# Altium footprint library Connector.PcbLib: 272 footprints (part 3 of 17)
Each footprint in its own frame and in the unit in brackets; x right, y up, seen from the top. Pads: shape width x height; smd on the part's side, far side on the other; paste and mask are expansions set on the pad; w line width, h text height; cw(c..) or ccw(c..) is an arc to the next point about the centre after c.
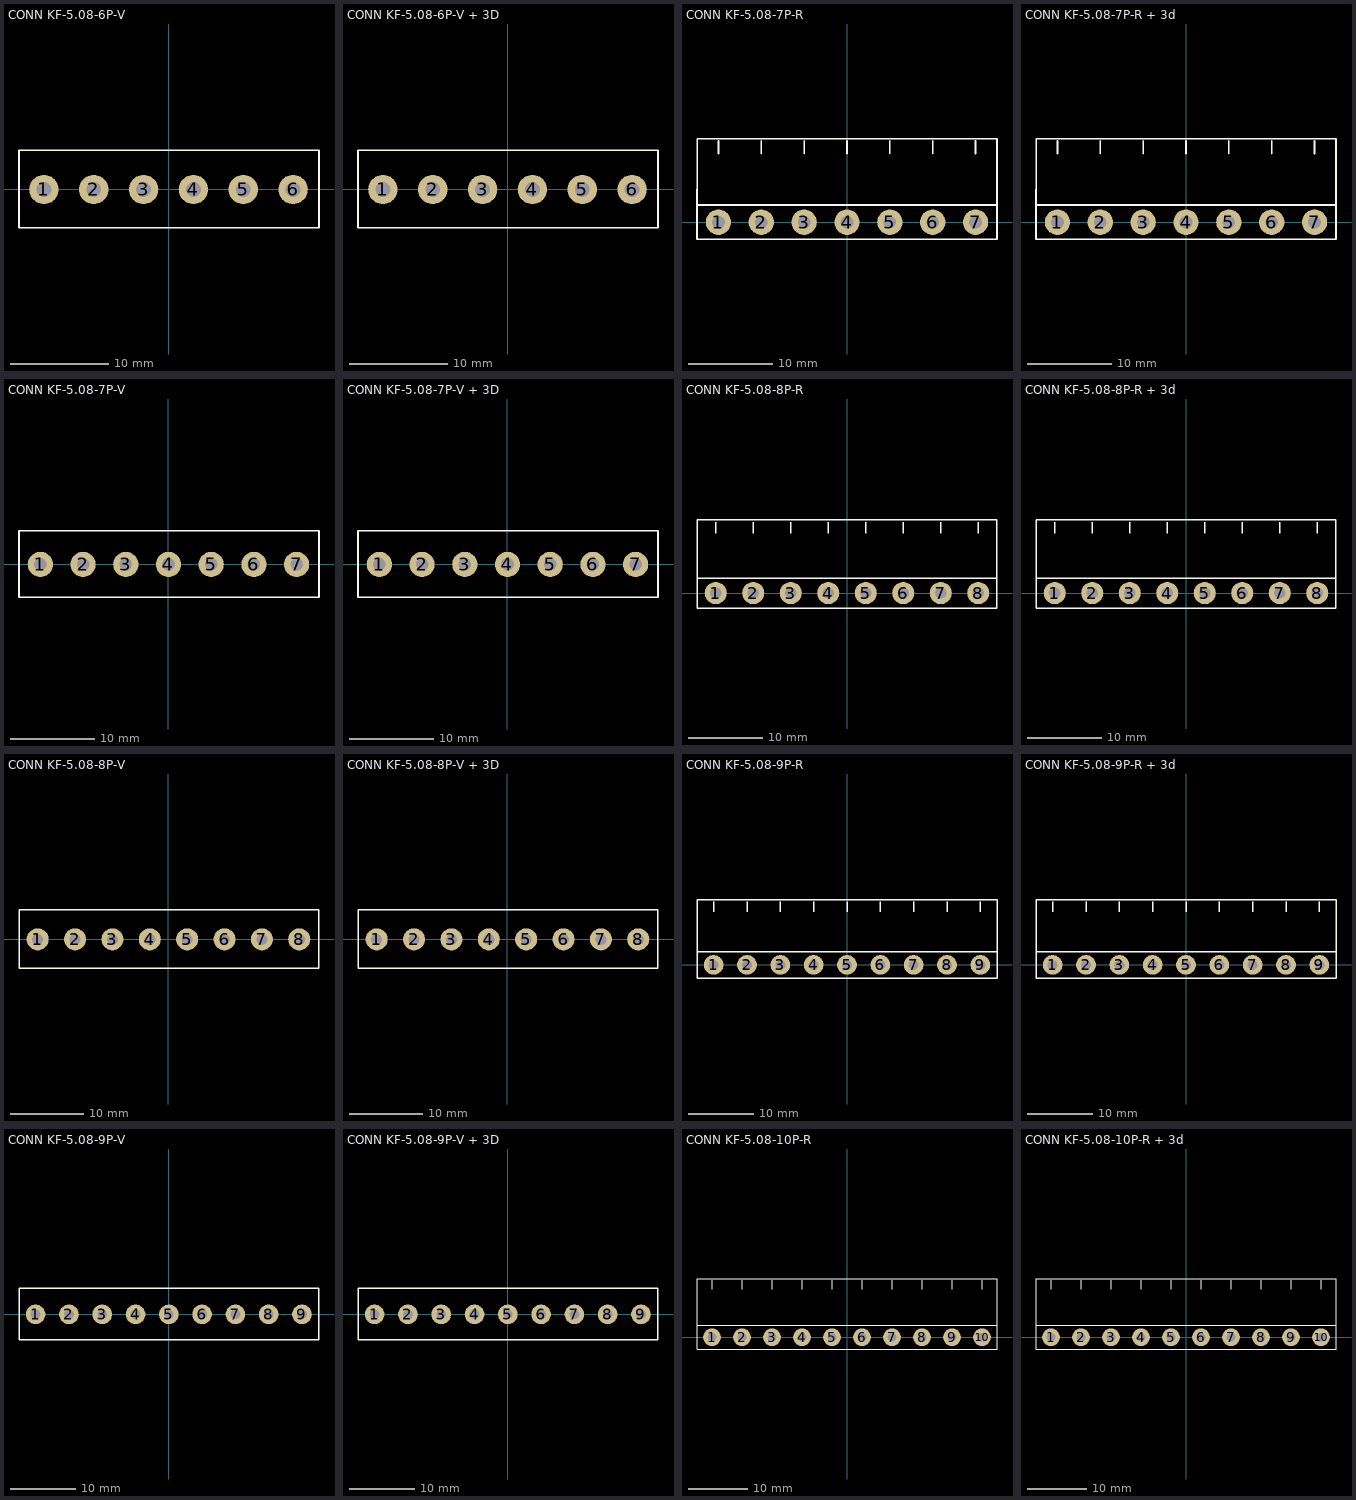
[diagram p2: the footprints below, top view; thin cyan lines are the x and y axes]

## CONN KF-5.08-6P-V [mm] "PHOENIX MSTBV 2.5/6-GF-5.08"
pads (6):
  round 3 hole 1.5: 1(-12.7,0) 2(-7.62,0) 3(-2.54,0) 4(2.54,0) 5(7.62,0) 6(12.7,0)
Top Overlay:
  lines w0.2: -15.24,-3.9 15.34,-3.9 15.34,4 -15.24,4 -15.24,-3.9
Top Designator:
  text ".Designator" at -3.66,0.056 h1.52
3D body "1753437.stp": height 12.1, standoff -3.8, extent -10.08,-3.8 -0.08,4.8
3D body "1753437.stp": height 12.1, standoff -3.8, extent -15.16,-3.8 -5.16,4.8
3D body "1753437.stp": height 12.1, standoff -3.8, extent -5,-3.8 5,4.8
3D body "1753437.stp": height 12.1, standoff -3.8, extent 0.08,-3.8 10.08,4.8
3D body "1753437.stp": height 12.1, standoff -3.8, extent 5.16,-3.8 15.16,4.8

## CONN KF-5.08-6P-V + 3D [mm] "PHOENIX MSTBV 2.5/6-GF-5.08"
pads (6):
  round 3 hole 1.5: 1(-12.7,0) 2(-7.62,0) 3(-2.54,0) 4(2.54,0) 5(7.62,0) 6(12.7,0)
Top Overlay:
  lines w0.2: -15.24,-3.9 -15.24,4 15.34,4 15.34,-3.9 -15.24,-3.9
Top Designator:
  text ".Designator" at -3.608,3.235 h1.52
3D body "PHOENIX_MSTB6W.stp": height 22.4, standoff 4.2, extent -14.935,-3.842 15.545,11.158
3D body "1753437.stp": height 12.1, standoff -3.8, extent 5.16,-3.8 15.16,4.8
3D body "1753437.stp": height 12.1, standoff -3.8, extent 0.08,-3.8 10.08,4.8
3D body "1753437.stp": height 12.1, standoff -3.8, extent -5,-3.8 5,4.8
3D body "1753437.stp": height 12.1, standoff -3.8, extent -15.16,-3.8 -5.16,4.8
3D body "1753437.stp": height 12.1, standoff -3.8, extent -10.08,-3.8 -0.08,4.8

## CONN KF-5.08-7P-R [mm] "PHOENIX MSTB 2, 5-G, 5.08mm pitch"
pads (7):
  round 3 hole 1.5: 1(-15.24,0) 2(-10.16,0) 3(-5.08,0) 4(0,0) 5(5.08,0) 6(10.16,0) 7(15.24,0)
Top Overlay:
  lines w0.2: -17.78,2.032 17.78,2.032 ; -17.526,9.906 17.526,9.906 ; -15.24,8.128 -15.24,9.618 ; -10.16,8.128 -10.16,9.618 ; -5.08,8.128 -5.08,9.618 ; 0,8.128 0,9.618 ; 5.08,8.128 5.08,9.618 ; 10.16,8.128 10.16,9.618 ; 15.24,8.128 15.24,9.618 ; -17.78,-2.032 -17.763,9.906 17.78,9.906 17.78,-2.032 -17.78,-2.032
Top Designator:
  text ".Designator" at -3.71,3.593 h1.52
3D body "PHOENIX_MSTB6.stp": height 8.6, standoff -3.5, extent -17.5,-2 17.5,10

## CONN KF-5.08-7P-R + 3d [mm] "PHOENIX MSTB 2, 5-G, 5.08mm pitch"
pads (7):
  round 3 hole 1.5: 1(-15.24,0) 2(-10.16,0) 3(-5.08,0) 4(0,0) 5(5.08,0) 6(10.16,0) 7(15.24,0)
Top Overlay:
  lines w0.2: -17.78,2.032 17.78,2.032 ; -17.526,9.906 17.526,9.906 ; -15.24,8.128 -15.24,9.618 ; -10.16,8.128 -10.16,9.618 ; -5.08,8.128 -5.08,9.618 ; 0,8.128 0,9.618 ; 5.08,8.128 5.08,9.618 ; 10.16,8.128 10.16,9.618 ; 15.24,8.128 15.24,9.618 ; -17.78,-2.032 17.78,-2.032 17.78,9.906 -17.763,9.906 -17.78,-2.032
Top Designator:
  text ".Designator" at -3.71,8.19 h1.52
3D body "PHOENIX_MSTB7W.stp": height 15.07, standoff 0.07, extent -17.86,1 17.7,19.2
3D body "PHOENIX_MSTB6.stp": height 8.6, standoff -3.5, extent -17.5,-2 17.5,10

## CONN KF-5.08-7P-V [mm] "PHOENIX MSTBV 2.5/7-GF-5.08"
pads (7):
  round 3 hole 1.5: 1(-15.24,0) 2(-10.16,0) 3(-5.08,0) 4(0,0) 5(5.08,0) 6(10.16,0) 7(15.24,0)
Top Overlay:
  lines w0.2: -17.78,-3.9 17.9,-3.9 17.9,4 -17.78,4 -17.78,-3.9
Top Designator:
  text ".Designator" at -3.65,0.056 h1.52
3D body "1753437.stp": height 12.1, standoff -3.8, extent 7.7,-3.8 17.7,4.8
3D body "1753437.stp": height 12.1, standoff -3.8, extent -12.62,-3.8 -2.62,4.8
3D body "1753437.stp": height 12.1, standoff -3.8, extent -17.7,-3.8 -7.7,4.8
3D body "1753437.stp": height 12.1, standoff -3.8, extent -7.54,-3.8 2.46,4.8
3D body "1753437.stp": height 12.1, standoff -3.8, extent -2.46,-3.8 7.54,4.8
3D body "1753437.stp": height 12.1, standoff -3.8, extent 2.62,-3.8 12.62,4.8

## CONN KF-5.08-7P-V + 3D [mm] "PHOENIX MSTBV 2.5/7-GF-5.08"
pads (7):
  round 3 hole 1.5: 1(-15.24,0) 2(-10.16,0) 3(-5.08,0) 4(0,0) 5(5.08,0) 6(10.16,0) 7(15.24,0)
Top Overlay:
  lines w0.2: -17.78,-3.9 17.9,-3.9 17.9,4 -17.78,4 -17.78,-3.9
Top Designator:
  text ".Designator" at -3.65,3.256 h1.52
3D body "PHOENIX_MSTB5w.stp": height 22.4, standoff 4.2, extent -17.78,-3.8 7.62,11.2
3D body "1753437.stp": height 12.1, standoff -3.8, extent 7.7,-3.8 17.7,4.8
3D body "1753437.stp": height 12.1, standoff -3.8, extent -12.62,-3.8 -2.62,4.8
3D body "1753437.stp": height 12.1, standoff -3.8, extent -17.7,-3.8 -7.7,4.8
3D body "1753437.stp": height 12.1, standoff -3.8, extent -7.54,-3.8 2.46,4.8
3D body "1753437.stp": height 12.1, standoff -3.8, extent -2.46,-3.8 7.54,4.8
3D body "1753437.stp": height 12.1, standoff -3.8, extent 2.62,-3.8 12.62,4.8
3D body "PHOENIX_MSTB2W.stp": height 22.4, standoff 4.2, extent 7.7,-3.8 17.7,11.2

## CONN KF-5.08-8P-R [mm] "PHOENIX MSTB 2, 5-G, 5.08mm pitch"
pads (8):
  round 3 hole 1.5: 1(-17.78,0) 2(-12.7,0) 3(-7.62,0) 4(-2.54,0) 5(2.54,0) 6(7.62,0) 7(12.7,0) 8(17.78,0)
Top Overlay:
  lines w0.2: -20.32,2.032 20.32,2.032 ; -17.78,8.128 -17.78,9.618 ; -12.7,8.128 -12.7,9.618 ; -7.62,8.128 -7.62,9.618 ; -2.54,8.128 -2.54,9.618 ; 2.54,8.128 2.54,9.618 ; 7.62,8.128 7.62,9.618 ; 12.7,8.128 12.7,9.618 ; 17.78,8.128 17.78,9.618 ; -20.32,-2.032 20.32,-2.032 20.32,9.906 -20.32,9.906 -20.32,-2.032
Top Designator:
  text ".Designator" at -3.71,3.593 h1.52
3D body "PHOENIX_MSTB8.stp": height 8.6, standoff -3.5, extent -20,-2 20,10

## CONN KF-5.08-8P-R + 3d [mm] "PHOENIX MSTB 2, 5-G, 5.08mm pitch"
pads (8):
  round 3 hole 1.5: 1(-17.78,0) 2(-12.7,0) 3(-7.62,0) 4(-2.54,0) 5(2.54,0) 6(7.62,0) 7(12.7,0) 8(17.78,0)
Top Overlay:
  lines w0.2: -20.32,2.032 20.32,2.032 ; -20.066,9.906 20.066,9.906 ; -17.78,8.128 -17.78,9.618 ; -12.7,8.128 -12.7,9.618 ; -7.62,8.128 -7.62,9.618 ; -2.54,8.128 -2.54,9.618 ; 2.54,8.128 2.54,9.618 ; 7.62,8.128 7.62,9.618 ; 12.7,8.128 12.7,9.618 ; 17.78,8.128 17.78,9.618 ; -20.32,-2.032 20.32,-2.032 20.32,9.906 -20.32,9.906 -20.32,-2.032
Top Designator:
  text ".Designator" at -3.71,8.19 h1.52
3D body "PHOENIX_MSTB8W.stp": height 15.07, standoff 0.07, extent -20.34,1 20.3,19.2
3D body "PHOENIX_MSTB8.stp": height 8.6, standoff -3.5, extent -20,-2 20,10

## CONN KF-5.08-8P-V [mm] "PHOENIX MSTBV 2.5/8-GF-5.08"
pads (8):
  round 3 hole 1.5: 1(-17.78,0) 2(-12.7,0) 3(-7.62,0) 4(-2.54,0) 5(2.54,0) 6(7.62,0) 7(12.7,0) 8(17.78,0)
Top Overlay:
  lines w0.2: -20.32,-3.9 -20.32,4 20.46,4 20.46,-3.9 -20.32,-3.9
Top Designator:
  text ".Designator" at -3.64,0.056 h1.52
3D body "1753437.stp": height 12.1, standoff -3.8, extent 10.24,-3.8 20.24,4.8
3D body "1753437.stp": height 12.1, standoff -3.8, extent 0.08,-3.8 10.08,4.8
3D body "1753437.stp": height 12.1, standoff -3.8, extent -5,-3.8 5,4.8
3D body "1753437.stp": height 12.1, standoff -3.8, extent -10.08,-3.8 -0.08,4.8
3D body "1753437.stp": height 12.1, standoff -3.8, extent -20.24,-3.8 -10.24,4.8
3D body "1753437.stp": height 12.1, standoff -3.8, extent -15.16,-3.8 -5.16,4.8
3D body "1753437.stp": height 12.1, standoff -3.8, extent 5.16,-3.8 15.16,4.8

## CONN KF-5.08-8P-V + 3D [mm] "PHOENIX MSTBV 2.5/8-GF-5.08"
pads (8):
  round 3 hole 1.5: 1(-17.78,0) 2(-12.7,0) 3(-7.62,0) 4(-2.54,0) 5(2.54,0) 6(7.62,0) 7(12.7,0) 8(17.78,0)
Top Overlay:
  lines w0.2: -20.32,-3.9 -20.32,4 20.46,4 20.46,-3.9 -20.32,-3.9
Top Designator:
  text ".Designator" at -3.64,3.256 h1.52
3D body "PHOENIX_MSTB2W.stp": height 22.4, standoff 4.2, extent 0.08,-3.8 10.08,11.2
3D body "PHOENIX_MSTB2W.stp": height 22.4, standoff 4.2, extent 10.24,-3.8 20.24,11.2
3D body "PHOENIX_MSTB2W.stp": height 22.4, standoff 4.2, extent -20.24,-3.8 -10.24,11.2
3D body "PHOENIX_MSTB2W.stp": height 22.4, standoff 4.2, extent -10.08,-3.8 -0.08,11.2
3D body "1753437.stp": height 12.1, standoff -3.8, extent 10.24,-3.8 20.24,4.8
3D body "1753437.stp": height 12.1, standoff -3.8, extent 0.08,-3.8 10.08,4.8
3D body "1753437.stp": height 12.1, standoff -3.8, extent -5,-3.8 5,4.8
3D body "1753437.stp": height 12.1, standoff -3.8, extent -10.08,-3.8 -0.08,4.8
3D body "1753437.stp": height 12.1, standoff -3.8, extent -20.24,-3.8 -10.24,4.8
3D body "1753437.stp": height 12.1, standoff -3.8, extent -15.16,-3.8 -5.16,4.8
3D body "1753437.stp": height 12.1, standoff -3.8, extent 5.16,-3.8 15.16,4.8

## CONN KF-5.08-9P-R [mm] "PHOENIX MSTB 2, 5-G, 5.08mm pitch"
pads (9):
  round 3 hole 1.5: 1(-20.32,0) 2(-15.24,0) 3(-10.16,0) 4(-5.08,0) 5(0,0) 6(5.08,0) 7(10.16,0) 8(15.24,0) 9(20.32,0)
Top Overlay:
  lines w0.2: -22.86,2.032 22.86,2.032 ; -22.606,9.906 22.606,9.906 ; -20.32,8.128 -20.32,9.618 ; -15.24,8.128 -15.24,9.618 ; -10.16,8.128 -10.16,9.618 ; -5.08,8.128 -5.08,9.618 ; 0,8.128 0,9.618 ; 5.08,8.128 5.08,9.618 ; 10.16,8.128 10.16,9.618 ; 15.24,8.128 15.24,9.618 ; 20.32,8.128 20.32,9.618 ; -22.86,-2.032 22.86,-2.032 22.86,9.906 -22.86,9.906 -22.86,-2.032
Top Designator:
  text ".Designator" at -3.71,3.593 h1.52
3D body "PHOENIX_MSTB9.stp": height 8.6, standoff -3.5, extent -22.5,-2 22.5,10

## CONN KF-5.08-9P-R + 3d [mm] "PHOENIX MSTB 2, 5-G, 5.08mm pitch"
pads (9):
  round 3 hole 1.5: 1(-20.32,0) 2(-15.24,0) 3(-10.16,0) 4(-5.08,0) 5(0,0) 6(5.08,0) 7(10.16,0) 8(15.24,0) 9(20.32,0)
Top Overlay:
  lines w0.2: -22.86,2.032 22.86,2.032 ; -22.606,9.906 22.606,9.906 ; -20.32,8.128 -20.32,9.618 ; -15.24,8.128 -15.24,9.618 ; -10.16,8.128 -10.16,9.618 ; -5.08,8.128 -5.08,9.618 ; 0,8.128 0,9.618 ; 5.08,8.128 5.08,9.618 ; 10.16,8.128 10.16,9.618 ; 15.24,8.128 15.24,9.618 ; 20.32,8.128 20.32,9.618 ; -22.86,-2.032 -22.86,9.906 22.86,9.906 22.86,-2.032 -22.86,-2.032
Top Designator:
  text ".Designator" at -3.71,8.19 h1.52
3D body "PHOENIX_MSTB9W.stp": height 15.07, standoff 0.07, extent -22.82,1 22.9,19.2
3D body "PHOENIX_MSTB9.stp": height 8.6, standoff -3.5, extent -22.5,-2 22.5,10

## CONN KF-5.08-9P-V [mm] "PHOENIX MSTBV 2.5/9-GF-5.08"
pads (9):
  round 3 hole 1.5: 1(-20.32,0) 2(-15.24,0) 3(-10.16,0) 4(-5.08,0) 5(0,0) 6(5.08,0) 7(10.16,0) 8(15.24,0) 9(20.32,0)
Top Overlay:
  lines w0.2: -22.86,-3.9 22.92,-3.9 22.92,4 -22.86,4 -22.86,-3.9
Top Designator:
  text ".Designator" at -3.68,0.056 h1.52
3D body "1753437.stp": height 12.1, standoff -3.8, extent 12.78,-3.8 22.78,4.8
3D body "1753437.stp": height 12.1, standoff -3.8, extent 2.62,-3.8 12.62,4.8
3D body "1753437.stp": height 12.1, standoff -3.8, extent -17.7,-3.8 -7.7,4.8
3D body "1753437.stp": height 12.1, standoff -3.8, extent -22.78,-3.8 -12.78,4.8
3D body "1753437.stp": height 12.1, standoff -3.8, extent -12.62,-3.8 -2.62,4.8
3D body "1753437.stp": height 12.1, standoff -3.8, extent -7.54,-3.8 2.46,4.8
3D body "1753437.stp": height 12.1, standoff -3.8, extent -2.46,-3.8 7.54,4.8
3D body "1753437.stp": height 12.1, standoff -3.8, extent 7.7,-3.8 17.7,4.8

## CONN KF-5.08-9P-V + 3D [mm] "PHOENIX MSTBV 2.5/9-GF-5.08"
pads (9):
  round 3 hole 1.5: 1(-20.32,0) 2(-15.24,0) 3(-10.16,0) 4(-5.08,0) 5(0,0) 6(5.08,0) 7(10.16,0) 8(15.24,0) 9(20.32,0)
Top Overlay:
  lines w0.2: -22.86,-3.9 -22.86,4 22.92,4 22.92,-3.9 -22.86,-3.9
Top Designator:
  text ".Designator" at -3.68,3.256 h1.52
3D body "PHOENIX_MSTB9W.stp": height 22.4, standoff 4.2, extent -22.83,-3.8 22.89,11.2
3D body "1753437.stp": height 12.1, standoff -3.8, extent 7.7,-3.8 17.7,4.8
3D body "1753437.stp": height 12.1, standoff -3.8, extent -2.46,-3.8 7.54,4.8
3D body "1753437.stp": height 12.1, standoff -3.8, extent -7.54,-3.8 2.46,4.8
3D body "1753437.stp": height 12.1, standoff -3.8, extent -12.62,-3.8 -2.62,4.8
3D body "1753437.stp": height 12.1, standoff -3.8, extent -22.78,-3.8 -12.78,4.8
3D body "1753437.stp": height 12.1, standoff -3.8, extent -17.7,-3.8 -7.7,4.8
3D body "1753437.stp": height 12.1, standoff -3.8, extent 2.62,-3.8 12.62,4.8
3D body "1753437.stp": height 12.1, standoff -3.8, extent 12.78,-3.8 22.78,4.8

## CONN KF-5.08-10P-R [mm] "PHOENIX MSTB 2, 5-G, 5.08mm pitch"
pads (10):
  round 3 hole 1.5: 1(-22.86,0) 2(-17.78,0) 3(-12.7,0) 4(-7.62,0) 5(-2.54,0) 6(2.54,0) 7(7.62,0) 8(12.7,0) 9(17.78,0) 10(22.86,0)
Top Overlay:
  lines w0.2: -25.4,2.032 25.4,2.032 ; -25.146,9.906 25.146,9.906 ; -22.86,8.128 -22.86,9.618 ; -17.78,8.128 -17.78,9.618 ; -12.7,8.128 -12.7,9.618 ; -7.62,8.128 -7.62,9.618 ; -2.54,8.128 -2.54,9.618 ; 2.54,8.128 2.54,9.618 ; 7.62,8.128 7.62,9.618 ; 12.7,8.128 12.7,9.618 ; 17.78,8.128 17.78,9.618 ; 22.86,8.128 22.86,9.618 ; -25.4,-2.032 25.4,-2.032 25.4,9.906 -25.4,9.906 -25.4,-2.032
Top Designator:
  text ".Designator" at -3.71,3.593 h1.52
3D body "PHOENIX_MSTB10.stp": height 8.6, standoff -3.5, extent -25,-2 25,10

## CONN KF-5.08-10P-R + 3d [mm] "PHOENIX MSTB 2, 5-G, 5.08mm pitch"
pads (10):
  round 3 hole 1.5: 1(-22.86,0) 2(-17.78,0) 3(-12.7,0) 4(-7.62,0) 5(-2.54,0) 6(2.54,0) 7(7.62,0) 8(12.7,0) 9(17.78,0) 10(22.86,0)
Top Overlay:
  lines w0.2: -25.4,2.032 25.4,2.032 ; -25.146,9.906 25.146,9.906 ; -22.86,8.128 -22.86,9.618 ; -17.78,8.128 -17.78,9.618 ; -12.7,8.128 -12.7,9.618 ; -7.62,8.128 -7.62,9.618 ; -2.54,8.128 -2.54,9.618 ; 2.54,8.128 2.54,9.618 ; 7.62,8.128 7.62,9.618 ; 12.7,8.128 12.7,9.618 ; 17.78,8.128 17.78,9.618 ; 22.86,8.128 22.86,9.618 ; -25.4,-2.032 -25.4,9.906 25.4,9.906 25.4,-2.032 -25.4,-2.032
Top Designator:
  text ".Designator" at -3.71,8.19 h1.52
3D body "PHOENIX_MSTB10W.stp": height 15.07, standoff 0.07, extent -25.4,1 25.4,19.2
3D body "PHOENIX_MSTB10.stp": height 8.6, standoff -3.5, extent -25,-2 25,10